# Altium footprint library PCB.PcbLib: 11 footprints
Each footprint in its own frame and in the unit in brackets; x right, y up, seen from the top. Pads: shape width x height; smd on the part's side, far side on the other; paste and mask are expansions set on the pad; w line width, h text height; cw(c..) or ccw(c..) is an arc to the next point about the centre after c.
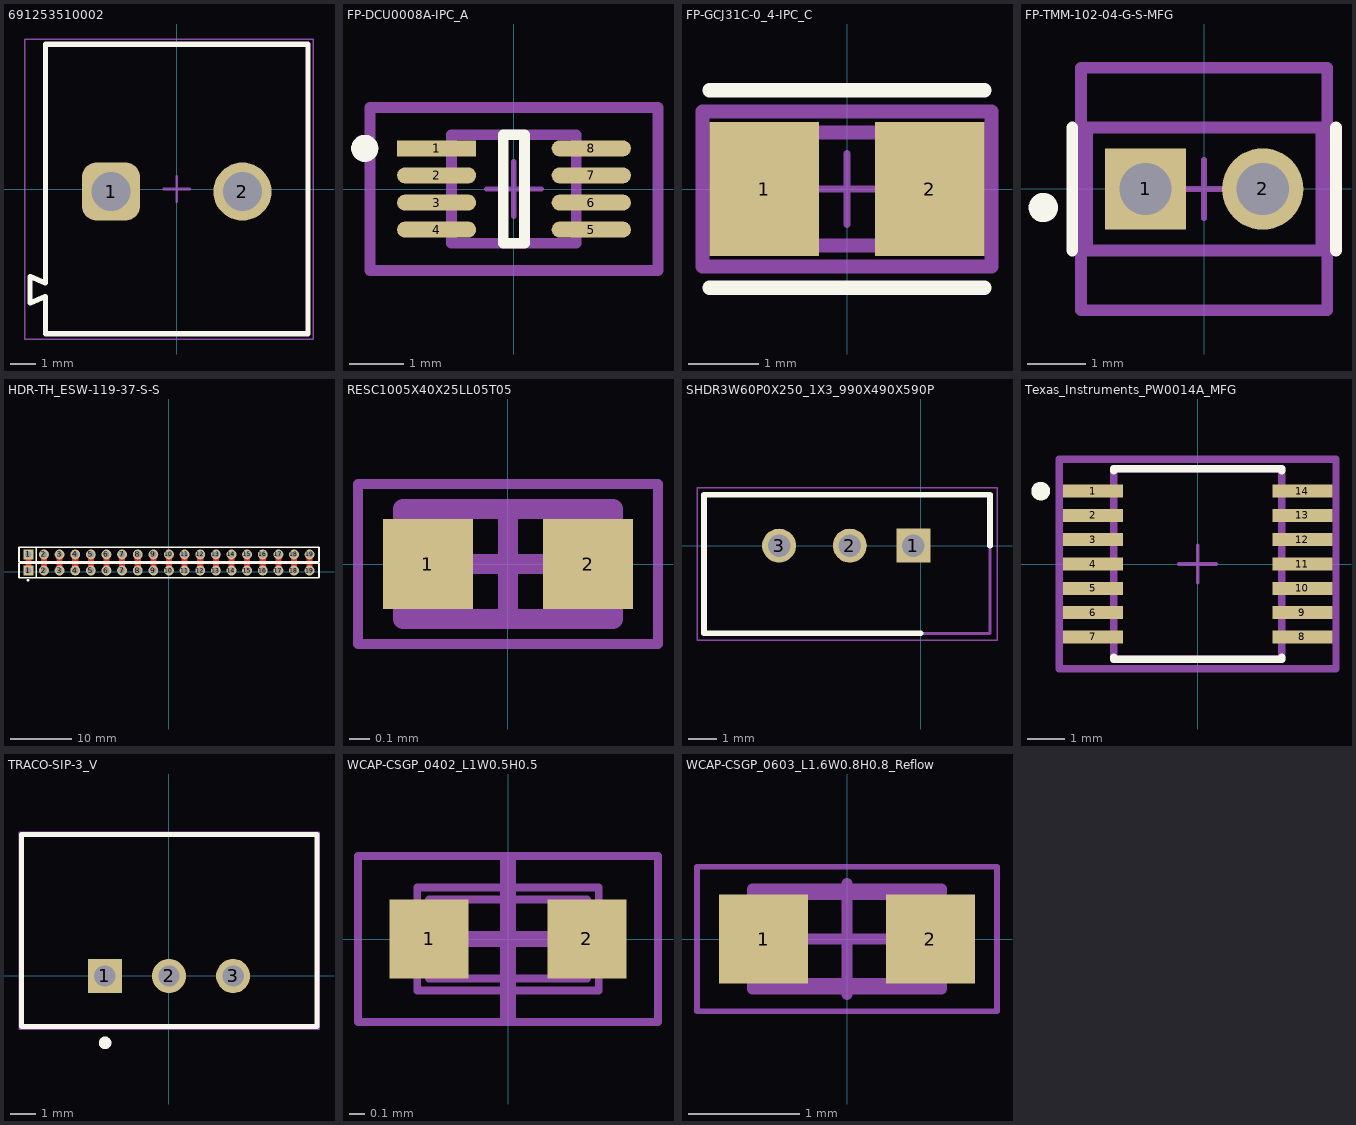
[diagram p0: the footprints below, top view; thin cyan lines are the x and y axes]

## 691253510002 [mm]
pads (2):
  rrect50% 2.25x2.25 hole 1.5: 1(-2.54,-0.1)
  round 2.25 hole 1.5: 2(2.54,-0.1)
Top Overlay:
  lines w0.2: -5.67,-4.41 -5.08,-4.154 -5.08,-5.6 5.08,-5.6 5.08,5.6 -5.08,5.6 -5.08,-3.636 -5.67,-3.38 -5.67,-4.41
Top Assembly:
  lines w0.1: -5.67,-4.41 -5.67,-3.38 -5.08,-3.636 -5.08,5.6 5.08,5.6 5.08,-5.6 -5.08,-5.6 -5.08,-4.154 -5.67,-4.41
Top Designator:
  text ".Designator" at -2.917,-0.286 h0.8
Top 3D Body:
  lines w0.1: -5.67,-4.41 -5.08,-4.154 -5.08,-5.6 5.08,-5.6 5.08,5.6 -5.08,5.6 -5.08,-3.636 -5.67,-3.38 -5.67,-4.41
Top Courtyard:
  lines w0.05: -5.88,-5.8 -5.88,5.8 5.28,5.8 5.28,-5.8 -5.88,-5.8
Top Component Center:
  lines w0.1: -0.5,0 0.5,0 ; 0,-0.5 0,0.5
3D body "691253510002.stp": height 18.1, standoff -3.9, extent -5.67,-5.6 5.09,5.6

## FP-DCU0008A-IPC_A [mm]
pads (8):
  rect 1.46x0.297 smd paste+0 mask+0: 1(-1.426,0.75)
  rrect100% 1.46x0.297 smd paste+0 mask+0: 2(-1.426,0.25) 3(-1.426,-0.25) 4(-1.426,-0.75) 5(1.426,-0.75) 6(1.426,-0.25) 7(1.426,0.25) 8(1.426,0.75)
Top Overlay:
  circle w0.25: c-2.75,0.75 r0.125
  lines w0.2: -0.196,-1 -0.196,1 0.196,1 0.196,-1 -0.196,-1
Top Assembly:
  lines w0.2: -2.656,-1.5 -2.656,1.5 2.656,1.5 2.656,-1.5 -2.656,-1.5
  text ".Designator" at 0,0.15 h0.8
Top 3D Body:
  lines w0.2: -1.15,-1 -1.15,1 1.15,1 1.15,-1 -1.15,-1
Top Courtyard:
  lines w0.2: -2.656,-1.5 -2.656,1.5 2.656,1.5 2.656,-1.5 -2.656,-1.5
Top Component Center:
  lines w0.1: -0.5,0 0.5,0 ; 0,-0.5 0,0.5
3D body "IC_Texas_Instruments_SN74LVC3G34DCUR_eec.STEP": height 0.25, standoff 0, extent -2.656,-1.5 2.656,1.5

## FP-GCJ31C-0_4-IPC_C [mm]
pads (2):
  rect 1.553x1.903 smd paste+0 mask+0: 1(-1.175,0) 2(1.175,0)
Top Overlay:
  lines w0.2: -1.952,-1.4 1.952,-1.4 ; -1.952,1.4 1.952,1.4
Top Assembly:
  lines w0.2: -2.052,-1.1 -2.052,1.1 2.052,1.1 2.052,-1.1 -2.052,-1.1
  text ".Designator" at 0,0.15 h0.8
Top 3D Body:
  lines w0.2: -1.6,-0.8 -1.6,0.8 1.6,0.8 1.6,-0.8 -1.6,-0.8
Top Courtyard:
  lines w0.2: -2.052,-1.1 -2.052,1.1 2.052,1.1 2.052,-1.1 -2.052,-1.1
Top Component Center:
  lines w0.1: -0.5,0 0.5,0 ; 0,-0.5 0,0.5
3D body "Cap_Murata_GCJ31CC71E106MA15L_eec.STEP": height 2, standoff 0, extent -1.6,-0.8 1.6,0.8

## FP-TMM-102-04-G-S-MFG [mm]
pads (2):
  rect 1.39x1.39 hole 0.89 paste-2539.97 mask+0: 1(-1,0)
  round 1.39 hole 0.89 paste-2539.97 mask+0: 2(1,0)
Top Overlay:
  circle w0.25: c-2.743,-0.317 r0.125
  lines w0.2: -2.25,-1.05 -2.25,1.05 ; 2.25,-1.05 2.25,1.05
Top Paste:
  region: 0.15,0.85 0.15,-0.85 0.615,-0.85 0.64,-0.852 0.687,-0.872 0.723,-0.908 0.743,-0.955 0.745,-0.98 0.745,-1.97 1.255,-1.97 1.255,-0.98 1.257,-0.955 1.277,-0.908 1.313,-0.872 1.36,-0.853 1.385,-0.85 1.85,-0.85 1.85,0.85
  region: -1.85,-0.85 -1.85,0.85 -1.385,0.85 -1.36,0.852 -1.313,0.872 -1.277,0.908 -1.257,0.955 -1.255,0.98 -1.255,1.97 -0.745,1.97 -0.745,0.98 -0.743,0.955 -0.723,0.908 -0.687,0.872 -0.64,0.852 -0.615,0.85 -0.15,0.85 -0.15,-0.85
Top Assembly:
  lines w0.2: -2.1,-2.07 2.1,-2.07 2.1,2.07 -2.1,2.07 -2.1,-2.07
  text ".Designator" at 0,-0.038 h0.8
Top 3D Body:
  lines w0.2: -2,-1.05 2,-1.05 2,1.05 -2,1.05 -2,-1.05
Top Courtyard:
  lines w0.2: -2.1,-2.07 2.1,-2.07 2.1,2.07 -2.1,2.07 -2.1,-2.07
Top Component Center:
  lines w0.1: -0.5,0 0.5,0 ; 0,-0.5 0,0.5

## HDR-TH_ESW-119-37-S-S [mm]
pads (38):
  rect 1.6x1.6 hole 1.02 paste-2539.97 mask+0.05: 1(-22.86,0.184) 1(-22.86,2.794)
  round 1.6 hole 1.02 paste-2539.97 mask+0.05: 2(-20.32,0.184) 2(-20.32,2.794) 3(-17.78,0.184) 3(-17.78,2.794) 4(-15.24,0.184) 4(-15.24,2.794) 5(-12.7,0.184) 5(-12.7,2.794) 6(-10.16,0.184) 6(-10.16,2.794) 7(-7.62,0.184) 7(-7.62,2.794) 8(-5.08,0.184) 8(-5.08,2.794) 9(-2.54,0.184) 9(-2.54,2.794) 10(0,0.184) 10(0,2.794) 11(2.54,0.184) 11(2.54,2.794) 12(5.08,0.184) 12(5.08,2.794) 13(7.62,0.184) 13(7.62,2.794) 14(10.16,0.184) 14(10.16,2.794) 15(12.7,0.184) 15(12.7,2.794) 16(15.24,0.184) 16(15.24,2.794) 17(17.78,0.184) 17(17.78,2.794) 18(20.32,0.184) 18(20.32,2.794) 19(22.86,0.184) 19(22.86,2.794)
Top Layer:
  lines w1: -22.86,0.184 -22.86,2.794 ; -20.32,0.184 -20.32,2.794 ; -17.78,0.184 -17.78,2.794 ; -15.24,0.184 -15.24,2.794 ; -12.7,0.184 -12.7,2.794 ; -10.16,0.184 -10.16,2.794 ; -7.62,0.184 -7.62,2.794 ; -5.08,0.184 -5.08,2.794 ; -2.54,0.184 -2.54,2.794 ; 0,0.184 0,2.794 ; 2.54,0.184 2.54,2.794 ; 5.08,0.184 5.08,2.794 ; 7.62,0.184 7.62,2.794 ; 10.16,0.184 10.16,2.794 ; 12.7,0.184 12.7,2.794 ; 15.24,0.184 15.24,2.794 ; 17.78,0.184 17.78,2.794 ; 20.32,0.184 20.32,2.794 ; 22.86,0.184 22.86,2.794
Top Overlay:
  circle w0.254: c-22.91,-1.416 r0.1
  lines w0.254: -21.549,-1.021 -21.549,1.389 ; -21.549,1.589 -21.549,3.999 ; -24.38,-1.021 -24.38,1.389 24.38,1.389 24.38,-1.021 -24.38,-1.021 ; -24.38,1.589 -24.38,3.999 24.384,3.999 24.384,1.589 -24.38,1.589
3D body "1x10.STEP": height 8.5, standoff -9.14, extent -1.016,-1.143 24.384,1.397
3D body "1x9.STEP": height 8.5, standoff -9.14, extent -23.876,-1.143 -1.016,1.397
3D body "1x10.STEP": height 8.5, standoff -9.14, extent -1.016,1.467 24.384,4.007
3D body "1x9.STEP": height 8.5, standoff -9.14, extent -23.876,1.467 -1.016,4.007

## RESC1005X40X25LL05T05 [mm]
pads (2):
  rect 0.45x0.45 smd: 1(-0.4,0) 2(0.4,0)
Top 3D Body:
  lines w0.1: -0.525,-0.275 -0.525,0.275 0.525,0.275 0.525,-0.275 -0.525,-0.275
Top Courtyard:
  lines w0.05: -0.75,-0.4 -0.75,0.4 0.75,0.4 0.75,-0.4 -0.75,-0.4
  lines w0.1: -0.275,0 0.275,0 ; 0,-0.275 0,0.275
3D body "RESC1005X04L.step": height 0.4, standoff 0, extent -0.525,-0.275 0.525,0.275

## SHDR3W60P0X250_1X3_990X490X590P [mm]
pads (3):
  rect 1.2x1.2 / inner round 1.2 / far side rect 1.2x1.2 hole 0.8: 1(-0.254,0)
  round 1.2 hole 0.8: 2(-2.5,0) 3(-5,0)
Top Overlay:
  lines w0.2: 0,-3.1 -7.65,-3.1 -7.65,1.8 2.45,1.8 2.45,0
Top Courtyard:
  lines w0.1: -7.65,-3.1 -7.65,1.8 2.45,1.8 2.45,-3.1 -7.65,-3.1
Mechanical 20:
  lines w0.05: -7.9,-3.35 -7.9,2.05 2.7,2.05 2.7,-3.35 -7.9,-3.35
3D body "0022035035.stp": height 5.8, standoff -3.6, extent -7.704,-3.1 2.196,1.8

## Texas_Instruments_PW0014A_MFG [mm]
pads (14):
  rect 1.6x0.35 smd paste-1000 mask+0: 1(-2.8,1.95) 2(-2.8,1.3) 3(-2.8,0.65) 4(-2.8,0) 5(-2.8,-0.65) 6(-2.8,-1.3) 7(-2.8,-1.95) 8(2.8,-1.95) 9(2.8,-1.3) 10(2.8,-0.65) 11(2.8,0) 12(2.8,0.65) 13(2.8,1.3) 14(2.8,1.95)
Top Overlay:
  circle w0.25: c-4.2,1.95 r0.125
  lines w0.2: -2.25,-2.5 -2.25,-2.55 2.25,-2.55 2.25,-2.5 ; -2.25,2.5 -2.25,2.55 2.25,2.55 2.25,2.5
Top Paste:
  rectangle: 2.025,1.8 3.575,2.1
  rectangle: 2.025,1.15 3.575,1.45
  rectangle: 2.025,0.5 3.575,0.8
  rectangle: 2.025,-0.15 3.575,0.15
  rectangle: 2.025,-0.8 3.575,-0.5
  rectangle: 2.025,-1.45 3.575,-1.15
  rectangle: 2.025,-2.1 3.575,-1.8
  rectangle: -3.575,1.8 -2.025,2.1
  rectangle: -3.575,1.15 -2.025,1.45
  rectangle: -3.575,0.5 -2.025,0.8
  rectangle: -3.575,-0.15 -2.025,0.15
  rectangle: -3.575,-0.8 -2.025,-0.5
  rectangle: -3.575,-1.45 -2.025,-1.15
  rectangle: -3.575,-2.1 -2.025,-1.8
Bottom Assembly:
  lines w0.2: -3.7,-2.8 3.7,-2.8 3.7,2.8 -3.7,2.8 -3.7,-2.8
  text ".Designator" at 0,0.15 h0.8
Bottom Designator:
  lines w0.2: -2.25,-2.55 2.25,-2.55 2.25,2.55 -2.25,2.55 -2.25,-2.55
Top Courtyard:
  lines w0.1: -0.5,0 0.5,0 ; 0,-0.5 0,0.5
  lines w0.2: -3.7,-2.8 3.7,-2.8 3.7,2.8 -3.7,2.8 -3.7,-2.8
3D body "IC_Texas_Instruments_TXB0104PWR_eec.STEP": height 0.25, standoff 0, extent -3.7,-2.8 3.7,2.8

## TRACO-SIP-3_V [mm]
pads (3):
  rect 1.35x1.35 hole 0.85 paste-2539.97: 1(-2.54,0)
  round 1.35 hole 0.85 paste-2539.97: 2(0,0) 3(2.54,0)
Top Overlay:
  circle w0.25: c-2.53,-2.645 r0.125
  lines w0.2: -5.84,-2 5.86,-2 5.86,5.6 -5.84,5.6 -5.84,-2
Top 3D Body:
  lines w0.1: 5.86,-2 -5.84,-2 -5.84,5.6 5.86,5.6 5.86,-1.99
Top Courtyard:
  lines w0.05: -5.94,-2.1 -5.94,5.7 5.94,5.7 5.94,-2.1 -5.94,-2.1
  lines w0.1: -0.5,0 0.5,0 ; 0,-0.5 0,0.5
3D body: height 0, standoff -4.1, extent -2.848,-0.232 -2.213,0.276
3D body: height 0, standoff -4.1, extent 2.232,-0.232 2.867,0.276
3D body: height 0, standoff -4.1, extent -0.307,-0.232 0.328,0.276
3D body: height 10.2, standoff 0, extent -5.84,-2 5.86,5.6

## WCAP-CSGP_0402_L1W0.5H0.5 [mm]
pads (2):
  rect 0.5x0.5 smd: 1(-0.5,0) 2(0.5,0)
Top Assembly:
  lines w0.05: -0.575,-0.325 -0.575,0.325 0.575,0.325 0.575,-0.325 -0.575,-0.325
Top Designator:
  text ".Designator" at -2.917,-0.286 h0.8
Top 3D Body:
  lines w0.05: -0.5,-0.25 -0.5,0.25 0.5,0.25 0.5,-0.25 -0.5,-0.25
Top Courtyard:
  lines w0.05: -0.95,-0.525 -0.95,0.525 0.95,0.525 0.95,-0.525 -0.95,-0.525
Top Component Center:
  lines w0.1: -0.5,0 0.5,0 ; 0,-0.5 0,0.5
3D body "CAPC1005X05N.step": height 0.5, standoff 0, extent -0.5,-0.25 0.5,0.25

## WCAP-CSGP_0603_L1.6W0.8H0.8_Reflow [mm]
pads (2):
  rect 0.8x0.8 smd: 1(-0.75,0) 2(0.75,0)
Top Assembly:
  lines w0.1: -0.85,-0.45 -0.85,0.45 0.85,0.45 0.85,-0.45 -0.85,-0.45
Top Designator:
  text ".Designator" at -2.917,-0.286 h0.8
Top 3D Body:
  lines w0.1: -0.8,-0.4 -0.8,0.4 0.8,0.4 0.8,-0.4 -0.8,-0.4
Top Courtyard:
  lines w0.05: -1.35,-0.65 -1.35,0.65 1.35,0.65 1.35,-0.65 -1.35,-0.65
Top Component Center:
  lines w0.1: -0.5,0 0.5,0 ; 0,-0.5 0,0.5
3D body "CAPC1608X08N.step": height 0.8, standoff 0, extent -0.8,-0.4 0.8,0.4